# EAGLE library part CDP1802BCE (library cdp)
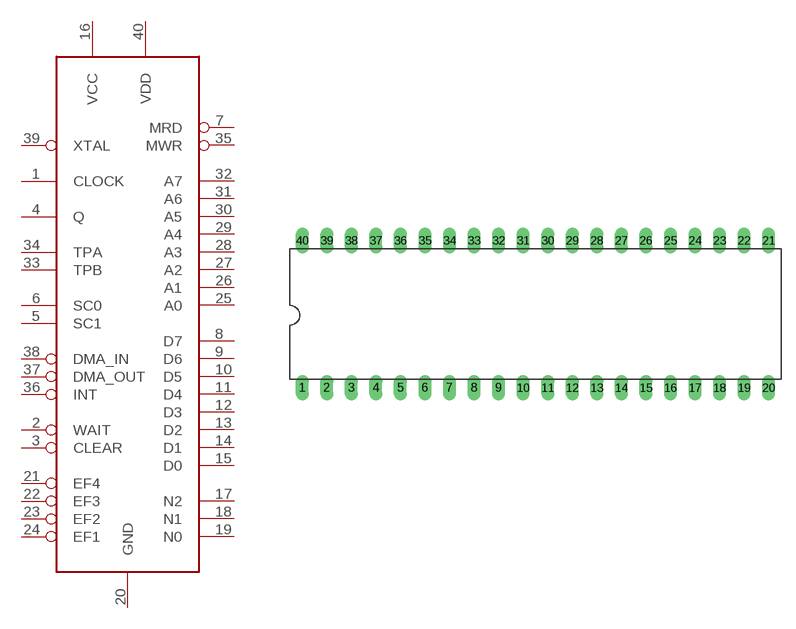
[diagram p0: symbol with the pads of DIL40; footprint DIL40]

Designator prefix -

## CDP1802BCECDP1802BCE  [DIL40]
1  CLOCK
2  WAIT
3  CLEAR
4  Q
5  SC1
6  SC0
7  MRD
8  D7
9  D6
10  D5
11  D4
12  D3
13  D2
14  D1
15  D0
16  VCC
17  N2
18  N1
19  N0
20  GND
21  EF4
22  EF3
23  EF2
24  EF1
25  A0
26  A1
27  A2
28  A3
29  A4
30  A5
31  A6
32  A7
33  TPB
34  TPA
35  MWR
36  INT
37  DMA_OUT
38  DMA_IN
39  XTAL
40  VDD

## Footprint DIL40 (pad centres in mm)
drill 0.813 long: 1 -24.13,-7.62; 2 -21.59,-7.62; 3 -19.05,-7.62; 4 -16.51,-7.62; 5 -13.97,-7.62; 6 -11.43,-7.62; 7 -8.89,-7.62; 8 -6.35,-7.62; 9 -3.81,-7.62; 10 -1.27,-7.62; 11 1.27,-7.62; 12 3.81,-7.62; 13 6.35,-7.62; 14 8.89,-7.62; 15 11.43,-7.62; 16 13.97,-7.62; 17 16.51,-7.62; 18 19.05,-7.62; 19 21.59,-7.62; 20 24.13,-7.62; 21 24.13,7.62; 22 21.59,7.62; 23 19.05,7.62; 24 16.51,7.62; 25 13.97,7.62; 26 11.43,7.62; 27 8.89,7.62; 28 6.35,7.62; 29 3.81,7.62; 30 1.27,7.62; 31 -1.27,7.62; 32 -3.81,7.62; 33 -6.35,7.62; 34 -8.89,7.62; 35 -11.43,7.62; 36 -13.97,7.62; 37 -16.51,7.62; 38 -19.05,7.62; 39 -21.59,7.62; 40 -24.13,7.62